# Altium footprint library S-2050.PcbLib: 1 footprints
Each footprint in its own frame and in the unit in brackets; x right, y up, seen from the top. Pads: shape width x height; smd on the part's side, far side on the other; paste and mask are expansions set on the pad; w line width, h text height; cw(c..) or ccw(c..) is an arc to the next point about the centre after c.
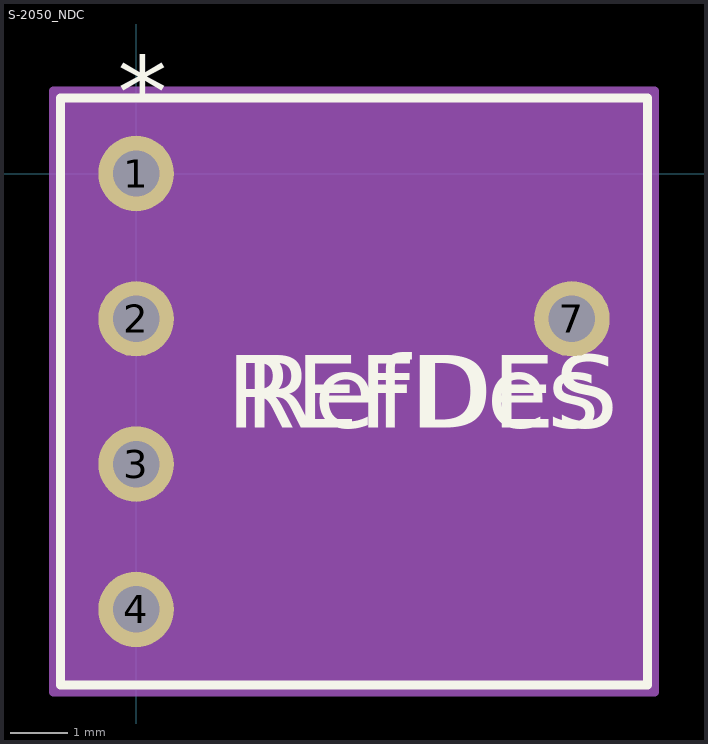
[diagram p0: the footprint, top view; thin cyan lines are the x and y axes]

## S-2050_NDC [mil]
pads (5):
  round 52 / inner round 60 / far side round 52 hole 32 paste-26 mask+0: 1(0,0) 2(0,-100) 3(0,-200) 4(0,-300) 7(300,-100)
Top Overlay:
  lines w6: -52,-352 352,-352 352,52 -52,52 -52,-352
  text "*" at -12.5,31 h50
  text "RefDes" at 75,-175 h50
  text "REFDES" at 62.5,-175 h50
Mechanical 13:
  lines w0: 138,47 ccw(c150,47) 162,47
  lines w1: -47,-347 347,-347 347,47 -47,47 -47,-347 ; -47,-316 -47,-284 -16,-284 -16,-316 -47,-316 ; -47,-216 -47,-184 -16,-184 -16,-216 -47,-216 ; -47,-116 -47,-84 -16,-84 -16,-116 -47,-116 ; -47,-16 -47,16 -16,16 -16,-16 -47,-16 ; 316,-116 347,-116 347,-84 316,-84 316,-116
  text "*" at -49.5,-25 h50
  text "RefDes2" at 62.5,-175 h50
Mechanical 15:
  region: 357,-336 357,36 357,57 -57,57 -57,36 -57,-336 -57,-357 357,-357
  lines w6: -57,-336 -57,36 ; -57,-336 -57,-336 ; -57,-336 -57,-357 357,-357 357,-336 ; -57,36 -57,36 ; -57,36 -57,57 357,57 357,36 ; 357,-336 357,36 ; 357,-336 357,-336 ; 357,36 357,36
3D body "S-2050_NDC.step": height 281.1, standoff -100, extent -5,-347.01 309.61,47.01